# Altium schematic symbol library 2020-12-12_21-43-40.SchLib: 2 symbols
Pins are listed as number, name and electrical type; pins without a type are passive.

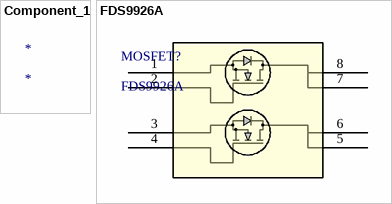
[diagram p0: symbols Component_1 to FDS9926A]

## Component_1
designator *

## FDS9926A
designator MOSFET?
No Description Available; Vendor: ON Semiconductor; Built_By: EMA_Cory; SourceLibrary: ON_Semiconductor_2020-07-21; Datasheet: https://www.onsemi.com/pub/Collateral/FDS9926A-D.pdf; Manufacturer_Part_Number: FDS9926A; Copyright: Copyright (C) 2018 Accelerated Designs. All rights reserved; RefDes: RefDes; Type: DEV
footprint SOIC8_751EB_ONS
pins: 1, 2, 3, 4, 5, 6, 7, 8